# Altium footprint library EasyLib.PcbLib: 65 footprints (part 4 of 5)
Each footprint in its own frame and in the unit in brackets; x right, y up, seen from the top. Pads: shape width x height; smd on the part's side, far side on the other; paste and mask are expansions set on the pad; w line width, h text height; cw(c..) or ccw(c..) is an arc to the next point about the centre after c.
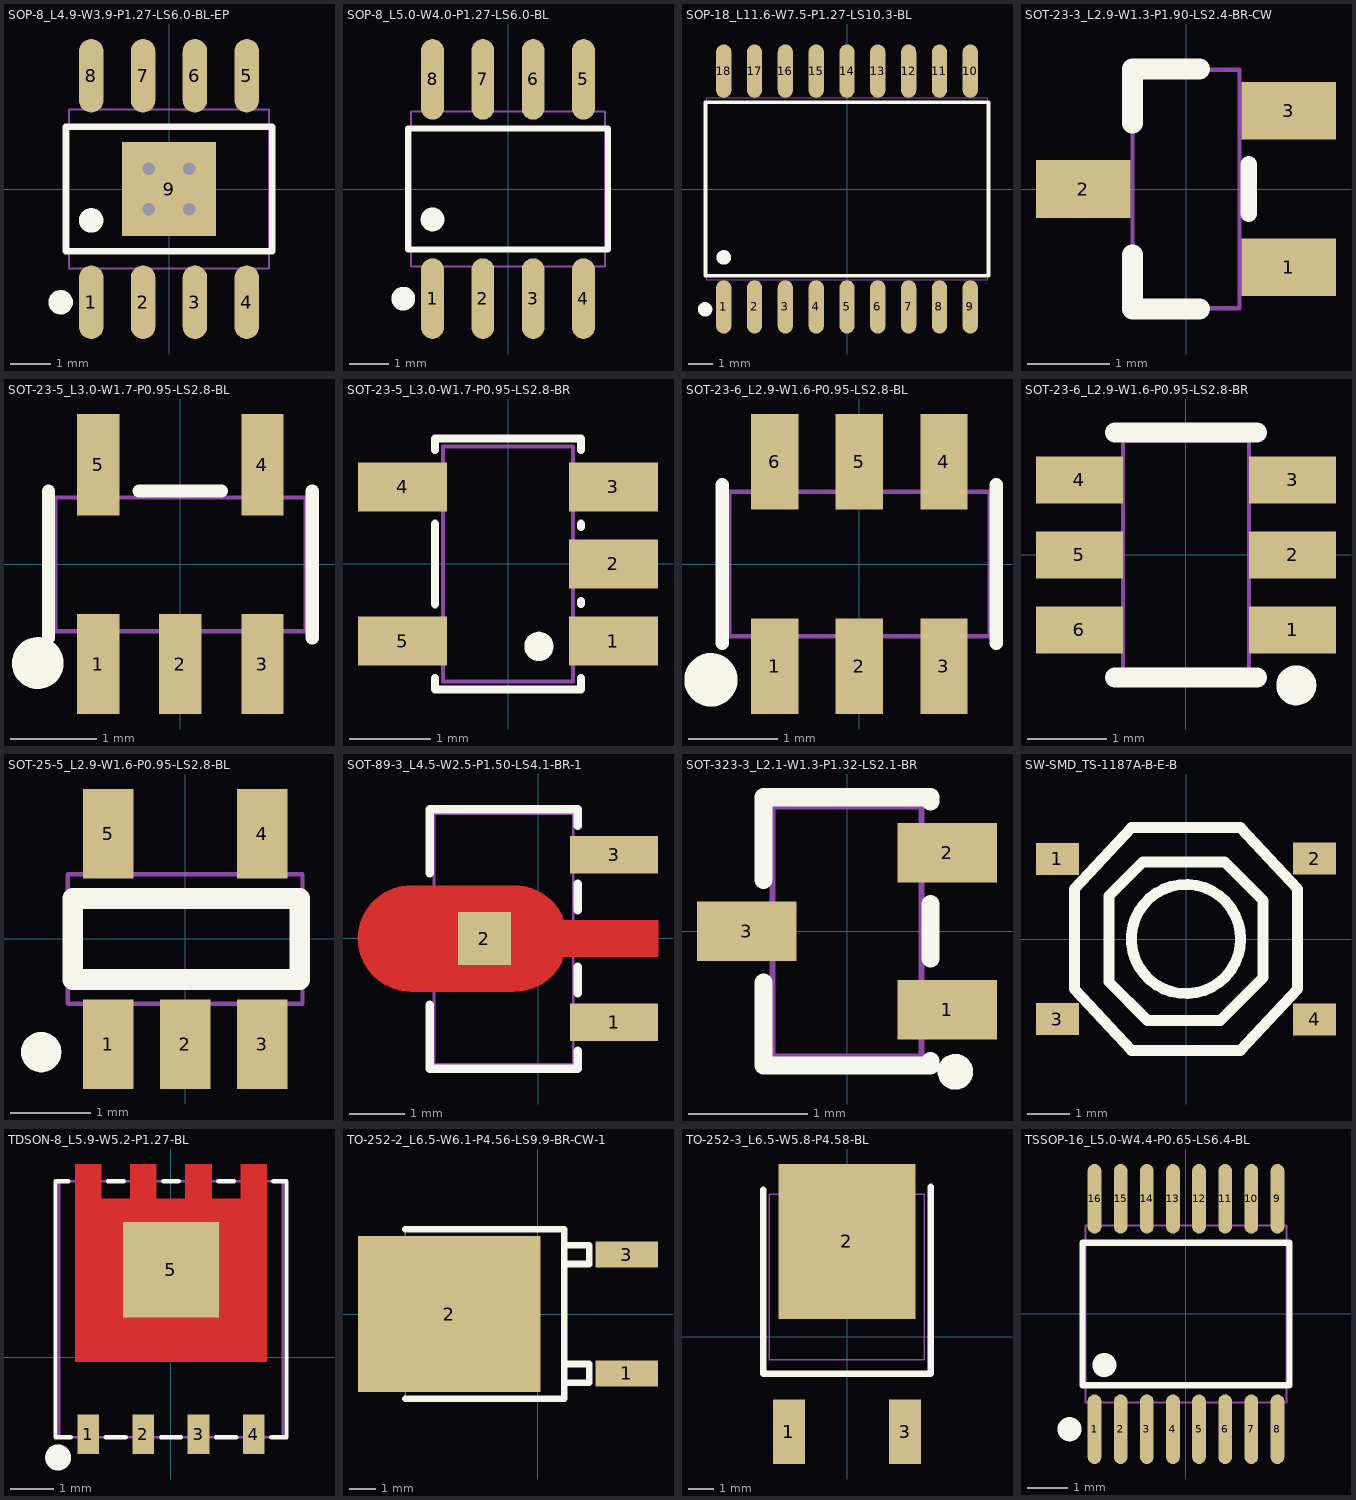
[diagram p3: the footprints below, top view; thin cyan lines are the x and y axes]

## SOP-8_L4.9-W3.9-P1.27-LS6.0-BL-EP [mm]
height 1.75
pads (13):
  oval 0.6x1.8 smd: 1(-1.905,-2.772) 2(-0.635,-2.772) 3(0.635,-2.772) 4(1.905,-2.772) 5(1.905,2.772) 6(0.635,2.772) 7(-0.635,2.772) 8(-1.905,2.772)
  rect 2.29x2.29 smd: 9(0,0)
  round 0.61 hole 0.305: ""(-0.5,-0.5) ""(-0.5,0.5) ""(0.5,-0.5) ""(0.5,0.5)
Top Overlay:
  circle w0.3: c-1.905,-0.769 r0.15
  circle w0.3: c-2.652,-2.772 r0.15
  lines w0.152: -2.526,-1.521 -2.526,1.521 2.526,1.521 2.526,-1.521 -2.526,-1.521
Mechanical 15:
  lines w0.051: -2.45,-1.95 -2.45,1.95 2.45,1.95 2.45,-1.95 -2.45,-1.95
3D body "SOP-8_L4.9-W3.9-H1.7-LS6.0-P1.30.step": height 1.75, standoff 0, extent -2.45,-3.053 2.45,3.053

## SOP-8_L5.0-W4.0-P1.27-LS6.0-BL [mm]
height 1.801
pads (8):
  oval 0.574x2.036 smd: 1(-1.905,-2.768) 2(-0.635,-2.768) 3(0.635,-2.768) 4(1.905,-2.768) 5(1.905,2.768) 6(0.635,2.768) 7(-0.635,2.768) 8(-1.905,2.768)
Top Overlay:
  circle w0.3: c-1.905,-0.769 r0.15
  circle w0.3: c-2.644,-2.768 r0.15
  lines w0.152: -2.526,-1.521 -2.526,1.521 2.526,1.521 2.526,-1.521 -2.526,-1.521
Mechanical 15:
  lines w0.051: -2.45,-1.95 -2.45,1.95 2.45,1.95 2.45,-1.95 -2.45,-1.95
3D body "SOP-8_L5.0-W4.0-H1.8-LS6.2-P1.27.step": height 1.8, standoff 0, extent -2.5,-3.103 2.5,3.103

## SOP-18_L11.6-W7.5-P1.27-LS10.3-BL [mm]
height 2.481
pads (18):
  oval 0.63x2.2 smd: 1(-5.08,-4.857) 2(-3.81,-4.857) 3(-2.54,-4.857) 4(-1.27,-4.857) 5(0,-4.857) 6(1.27,-4.857) 7(2.54,-4.857) 8(3.81,-4.857) 9(5.08,-4.857) 10(5.08,4.857) 11(3.81,4.857) 12(2.54,4.857) 13(1.27,4.857) 14(0,4.857) 15(-1.27,4.857) 16(-2.54,4.857) 17(-3.81,4.857) 18(-5.08,4.857)
Top Overlay:
  circle w0.3: c-5.08,-2.819 r0.15
  circle w0.3: c-5.847,-4.958 r0.15
  lines w0.152: -5.826,-3.571 -5.826,3.571 5.826,3.571 5.826,-3.571 -5.826,-3.571
Mechanical 15:
  lines w0.051: -5.775,-3.75 -5.775,3.75 5.775,3.75 5.775,-3.75 -5.775,-3.75
3D body "SOP-18_L11.5-W7.5-H2.5-LS10.3-P1.27.step": height 2.48, standoff 0, extent -5.725,-5.15 5.725,5.15

## SOT-23-3_L2.9-W1.3-P1.90-LS2.4-BR-CW [mm]
height 1.416
pads (3):
  rect 1.15x0.7 smd: 1(1.25,-0.95) 2(-1.25,0) 3(1.25,0.95)
Top Overlay:
  lines w0.2: 0.762,-0.3 0.762,0.3
  lines w0.254: -0.65,-0.8 -0.65,-1.46 0.165,-1.46 ; 0.165,1.46 -0.65,1.46 ; -0.65,0.8 -0.65,1.46 ; -0.65,0.8 -0.65,1.46 ; -0.65,0.8 -0.65,1.46
Mechanical 15:
  lines w0.051: -0.65,-1.45 -0.65,1.45 0.65,1.45 0.65,-1.45 -0.65,-1.45
3D body "SOT-23-3_L2.9-W1.3-P1.90-LS2.4-BR-CW.step": height 1.42, standoff 0, extent -1.45,-1.3 1.45,1.3

## SOT-23-5_L3.0-W1.7-P0.95-LS2.8-BL [mm]
height 1.25
pads (5):
  rect 0.49x1.157 smd: 1(-0.95,-1.154) 2(0,-1.154) 3(0.95,-1.154)
  rect 0.49x1.175 smd: 4(0.95,1.154) 5(-0.95,1.154)
Top Overlay:
  circle w0.3: c-1.651,-1.143 r0.15
  lines w0.152: -1.526,-0.851 -1.526,0.851 ; -0.476,0.851 0.476,0.851 ; 1.526,-0.851 1.526,0.851
Mechanical 15:
  lines w0.051: -1.45,-0.775 1.45,-0.775 1.45,0.775 -1.45,0.775 -1.45,-0.775
3D body "SOT-23-5_L2.9-W1.6-H1.1-LS2.8-P0.95.step": height 1.25, standoff 0, extent -1.45,-1.506 1.45,1.506

## SOT-23-5_L3.0-W1.7-P0.95-LS2.8-BR [mm]
height 1.25
pads (5):
  rect 1.1x0.6 smd: 1(1.3,-0.95) 2(1.3,0) 3(1.3,0.95) 4(-1.3,0.95) 5(-1.3,-0.95)
Top Overlay:
  region: 0.204,-1.016 0.205,-0.994 0.209,-0.972 0.216,-0.95 0.225,-0.93 0.237,-0.911 0.251,-0.894 0.267,-0.878 0.286,-0.865 0.305,-0.854 0.326,-0.846 0.348,-0.84 0.37,-0.837 0.392,-0.837 0.414,-0.84 0.436,-0.846 0.457,-0.854 0.477,-0.865 0.495,-0.878 0.511,-0.894 0.525,-0.911 0.537,-0.93 0.546,-0.95 0.553,-0.972 0.557,-0.994 0.558,-1.016 0.557,-1.038 0.553,-1.06 0.546,-1.082 0.537,-1.102 0.525,-1.121 0.511,-1.138 0.495,-1.154 0.477,-1.167 0.457,-1.178 0.436,-1.186 0.414,-1.192 0.392,-1.195 0.37,-1.195 0.348,-1.192 0.326,-1.186 0.305,-1.178 0.286,-1.167 0.267,-1.154 0.251,-1.138 0.237,-1.121 0.225,-1.102 0.216,-1.082 0.209,-1.06 0.205,-1.038
  lines w0.1: -0.9,-1.404 -0.9,-1.55 0.9,-1.55 0.9,-1.404 ; -0.9,-0.496 -0.9,0.496 ; -0.9,1.404 -0.9,1.55 0.9,1.55 0.9,1.404 ; 0.9,-0.496 0.9,-0.454 ; 0.9,0.454 0.9,0.496
Mechanical 15:
  lines w0.051: -0.8,-1.45 0.8,-1.45 0.8,1.45 -0.8,1.45 -0.8,-1.45
3D body "SOT-23-5_L2.9-W1.6-H1.1-LS2.8-P0.95.step": height 1.25, standoff 0, extent -1.506,-1.45 1.506,1.45

## SOT-23-6_L2.9-W1.6-P0.95-LS2.8-BL [mm]
height 1.65
pads (6):
  rect 0.532x1.072 smd: 1(-0.95,-1.149) 2(0,-1.149) 3(0.95,-1.149) 4(0.95,1.149) 5(0,1.149) 6(-0.95,1.149)
Top Overlay:
  circle w0.3: c-1.668,-1.301 r0.15
  lines w0.152: -1.539,-0.889 -1.539,0.889 ; 1.539,-0.889 1.539,0.889
Mechanical 15:
  lines w0.051: -1.463,-0.813 1.463,-0.813 1.463,0.813 -1.463,0.813 -1.463,-0.813
3D body "SOT-23-6_L2.9-W1.6-H1.5-LS2.8-P0.95.step": height 1.65, standoff 0, extent -1.45,-1.406 1.45,1.406

## SOT-23-6_L2.9-W1.6-P0.95-LS2.8-BR [mm]
height 1.65
pads (6):
  rect 1.1x0.6 smd: 1(1.35,-0.95) 2(1.35,0) 3(1.35,0.95) 4(-1.35,0.95) 5(-1.35,0) 6(-1.35,-0.95)
Top Overlay:
  circle w0.254: c1.397,-1.651 r0.127
  lines w0.254: -0.9,-1.55 0.9,-1.55 ; -0.9,1.55 0.9,1.55
Mechanical 15:
  lines w0.051: -0.8,-1.45 -0.8,1.45 0.8,1.45 0.8,-1.45 -0.8,-1.45
3D body "SOT-23-6_L2.9-W1.6-H1.5-LS2.8-P0.95.step": height 1.65, standoff 0, extent -1.406,-1.45 1.406,1.45

## SOT-25-5_L2.9-W1.6-P0.95-LS2.8-BL [mil]
height 49.25
pads (5):
  rect 24.5x43.5 smd: 1(-37.39,-51.18) 2(-0.02,-51.18) 3(37.39,-51.18) 4(37.39,51.18) 5(-37.39,51.18)
Top Overlay:
  lines w9.8: -70.06,-59.9 cw(c-70.01,-55) -69.96,-59.9
  lines w10: -54.61,-19.7 55.59,-19.7 55.59,19.7 -54.61,19.7 -54.61,-19.7
Mechanical 15:
  lines w2: -57.1,-31.5 -57.1,31.5 57.08,31.5 57.08,-31.5 -57.1,-31.5
3D body "SOT-25-5_L2.9-W1.6-P0.95-LS2.8-BL.step": height 49.25, standoff 0, extent -57.09,-55.12 57.09,55.12

## SOT-89-3_L4.5-W2.5-P1.50-LS4.1-BR-1 [mm]
height 1.531
pads (3):
  rect 1.575x0.672 smd: 1(1.356,-1.5) 3(1.356,1.5)
  rect 0.95x0.95 smd: 2(-0.966,0)
Top Layer:
  region: -2.283,0.95 -0.429,0.95 -0.384,0.949 -0.34,0.945 -0.296,0.94 -0.252,0.933 -0.208,0.924 -0.165,0.912 -0.123,0.899 -0.081,0.884 -0.04,0.866 0,0.847 0.04,0.826 0.078,0.803 0.115,0.779 0.151,0.752 0.185,0.724 0.219,0.695 0.251,0.663 0.281,0.631 0.31,0.597 0.337,0.562 0.362,0.525 0.386,0.487 0.408,0.449 0.428,0.409 0.447,0.33 2.144,0.33 2.144,-0.33 0.447,-0.33 0.428,-0.41 0.408,-0.449 0.386,-0.488 0.362,-0.526 0.337,-0.562 0.31,-0.598 0.281,-0.632 0.251,-0.664 0.219,-0.695 0.185,-0.725 0.151,-0.753 0.115,-0.779 0.078,-0.804 0.04,-0.827 0,-0.848 -0.04,-0.867 -0.081,-0.884 -0.123,-0.9 -0.165,-0.913 -0.208,-0.924 -0.252,-0.934 -0.296,-0.941 -0.34,-0.946 -0.384,-0.949 -0.429,-0.95 -2.283,-0.95 -2.328,-0.949 -2.372,-0.946 -2.416,-0.941 -2.46,-0.934 -2.504,-0.924 -2.547,-0.913 -2.589,-0.9 -2.631,-0.884 -2.672,-0.867 -2.713,-0.848 -2.752,-0.827 -2.79,-0.804 -2.827,-0.779 -2.863,-0.753 -2.898,-0.725 -2.931,-0.695 -2.963,-0.664 -2.993,-0.632 -3.022,-0.598 -3.049,-0.562 -3.075,-0.526 -3.098,-0.488 -3.12,-0.449 -3.141,-0.41 -3.159,-0.369 -3.175,-0.328 -3.189,-0.285 -3.202,-0.243 -3.212,-0.199 -3.22,-0.156 -3.227,-0.111 -3.231,-0.067 -3.233,-0.023 -3.233,0.022 -3.231,0.066 -3.227,0.111 -3.22,0.155 -3.212,0.199 -3.202,0.242 -3.189,0.285 -3.175,0.327 -3.159,0.368 -3.141,0.409 -3.12,0.449 -3.098,0.487 -3.075,0.525 -3.049,0.562 -3.022,0.597 -2.993,0.631 -2.963,0.663 -2.931,0.695 -2.898,0.724 -2.863,0.752 -2.827,0.779 -2.79,0.803 -2.752,0.826 -2.713,0.847 -2.672,0.866 -2.631,0.884 -2.589,0.899 -2.547,0.912 -2.504,0.924 -2.46,0.933 -2.416,0.94 -2.372,0.945 -2.328,0.949
Top Overlay:
  lines w0.152: -1.95,-1.186 -1.95,-2.335 0.702,-2.335 0.702,-2.016 ; -1.95,1.168 -1.95,2.317 0.702,2.317 0.702,2.016 ; 0.702,-0.984 0.702,-0.51 ; 0.702,0.51 0.702,0.984
Top Paste:
  region: -2.283,0.95 -0.429,0.95 -0.384,0.949 -0.34,0.945 -0.296,0.94 -0.252,0.933 -0.208,0.924 -0.165,0.912 -0.123,0.899 -0.081,0.884 -0.04,0.866 0,0.847 0.04,0.826 0.078,0.803 0.115,0.779 0.151,0.752 0.185,0.724 0.219,0.695 0.251,0.663 0.281,0.631 0.31,0.597 0.337,0.562 0.362,0.525 0.386,0.487 0.408,0.449 0.428,0.409 0.447,0.33 2.144,0.33 2.144,-0.33 0.447,-0.33 0.428,-0.41 0.408,-0.449 0.386,-0.488 0.362,-0.526 0.337,-0.562 0.31,-0.598 0.281,-0.632 0.251,-0.664 0.219,-0.695 0.185,-0.725 0.151,-0.753 0.115,-0.779 0.078,-0.804 0.04,-0.827 0,-0.848 -0.04,-0.867 -0.081,-0.884 -0.123,-0.9 -0.165,-0.913 -0.208,-0.924 -0.252,-0.934 -0.296,-0.941 -0.34,-0.946 -0.384,-0.949 -0.429,-0.95 -2.283,-0.95 -2.328,-0.949 -2.372,-0.946 -2.416,-0.941 -2.46,-0.934 -2.504,-0.924 -2.547,-0.913 -2.589,-0.9 -2.631,-0.884 -2.672,-0.867 -2.713,-0.848 -2.752,-0.827 -2.79,-0.804 -2.827,-0.779 -2.863,-0.753 -2.898,-0.725 -2.931,-0.695 -2.963,-0.664 -2.993,-0.632 -3.022,-0.598 -3.049,-0.562 -3.075,-0.526 -3.098,-0.488 -3.12,-0.449 -3.141,-0.41 -3.159,-0.369 -3.175,-0.328 -3.189,-0.285 -3.202,-0.243 -3.212,-0.199 -3.22,-0.156 -3.227,-0.111 -3.231,-0.067 -3.233,-0.023 -3.233,0.022 -3.231,0.066 -3.227,0.111 -3.22,0.155 -3.212,0.199 -3.202,0.242 -3.189,0.285 -3.175,0.327 -3.159,0.368 -3.141,0.409 -3.12,0.449 -3.098,0.487 -3.075,0.525 -3.049,0.562 -3.022,0.597 -2.993,0.631 -2.963,0.663 -2.931,0.695 -2.898,0.724 -2.863,0.752 -2.827,0.779 -2.79,0.803 -2.752,0.826 -2.713,0.847 -2.672,0.866 -2.631,0.884 -2.589,0.899 -2.547,0.912 -2.504,0.924 -2.46,0.933 -2.416,0.94 -2.372,0.945 -2.328,0.949
Top Solder:
  region: -2.283,0.95 -0.429,0.95 -0.384,0.949 -0.34,0.945 -0.296,0.94 -0.252,0.933 -0.208,0.924 -0.165,0.912 -0.123,0.899 -0.081,0.884 -0.04,0.866 0,0.847 0.04,0.826 0.078,0.803 0.115,0.779 0.151,0.752 0.185,0.724 0.219,0.695 0.251,0.663 0.281,0.631 0.31,0.597 0.337,0.562 0.362,0.525 0.386,0.487 0.408,0.449 0.428,0.409 0.447,0.33 2.144,0.33 2.144,-0.33 0.447,-0.33 0.428,-0.41 0.408,-0.449 0.386,-0.488 0.362,-0.526 0.337,-0.562 0.31,-0.598 0.281,-0.632 0.251,-0.664 0.219,-0.695 0.185,-0.725 0.151,-0.753 0.115,-0.779 0.078,-0.804 0.04,-0.827 0,-0.848 -0.04,-0.867 -0.081,-0.884 -0.123,-0.9 -0.165,-0.913 -0.208,-0.924 -0.252,-0.934 -0.296,-0.941 -0.34,-0.946 -0.384,-0.949 -0.429,-0.95 -2.283,-0.95 -2.328,-0.949 -2.372,-0.946 -2.416,-0.941 -2.46,-0.934 -2.504,-0.924 -2.547,-0.913 -2.589,-0.9 -2.631,-0.884 -2.672,-0.867 -2.713,-0.848 -2.752,-0.827 -2.79,-0.804 -2.827,-0.779 -2.863,-0.753 -2.898,-0.725 -2.931,-0.695 -2.963,-0.664 -2.993,-0.632 -3.022,-0.598 -3.049,-0.562 -3.075,-0.526 -3.098,-0.488 -3.12,-0.449 -3.141,-0.41 -3.159,-0.369 -3.175,-0.328 -3.189,-0.285 -3.202,-0.243 -3.212,-0.199 -3.22,-0.156 -3.227,-0.111 -3.231,-0.067 -3.233,-0.023 -3.233,0.022 -3.231,0.066 -3.227,0.111 -3.22,0.155 -3.212,0.199 -3.202,0.242 -3.189,0.285 -3.175,0.327 -3.159,0.368 -3.141,0.409 -3.12,0.449 -3.098,0.487 -3.075,0.525 -3.049,0.562 -3.022,0.597 -2.993,0.631 -2.963,0.663 -2.931,0.695 -2.898,0.724 -2.863,0.752 -2.827,0.779 -2.79,0.803 -2.752,0.826 -2.713,0.847 -2.672,0.866 -2.631,0.884 -2.589,0.899 -2.547,0.912 -2.504,0.924 -2.46,0.933 -2.416,0.94 -2.372,0.945 -2.328,0.949
Mechanical 15:
  lines w0.051: -1.874,-2.259 -1.874,2.241 0.626,2.241 0.626,-2.259 -1.874,-2.259
3D body "SOT-89-3_L4.5-W2.5-P1.50-LS4.1-BR-1.step": height 1.53, standoff 0, extent -2.379,-2.241 1.721,2.24

## SOT-323-3_L2.1-W1.3-P1.32-LS2.1-BR [mm]
height 1.176
pads (3):
  rect 0.835x0.5 smd: 1(0.843,-0.66) 2(0.843,0.66) 3(-0.843,0)
Top Overlay:
  circle w0.15: c0.91,-1.18 r0.075
  lines w0.152: -0.701,-0.43 -0.701,-1.126 0.701,-1.126 0.701,-1.09 ; -0.701,0.43 -0.701,0.904 -0.701,1.126 0.701,1.126 0.701,1.09 ; 0.701,-0.23 0.701,0.23
Mechanical 15:
  lines w0.051: -0.625,-1.05 -0.625,1.05 0.625,1.05 0.625,-1.05 -0.625,-1.05
3D body "SOT-323-3_L2.0-W1.3-H1.0-LS2.1-P1.30.step": height 1.18, standoff 0, extent -1.05,-1 1.05,1

## SW-SMD_TS-1187A-B-E-B [mm]
pads (4):
  rect 1x0.75 smd: 1(-3,1.87) 2(3,1.875) 3(-3,-1.87) 4(3,-1.875)
Top Overlay:
  circle w0.254: c0,0 r1.275
  lines w0.254: -2.6,-1.168 -1.275,-2.6 1.275,-2.6 2.6,-1.168 2.6,1.168 1.275,2.6 -1.275,2.6 -2.6,1.168 -2.6,-1.168 ; -1.801,-0.998 -0.899,-1.9 0.8,-1.9 1.801,-0.899 1.801,0.899 0.899,1.801 -1.001,1.801 -1.801,1.001 -1.801,-0.998

## TDSON-8_L5.9-W5.2-P1.27-BL [mm]
height 1.061
pads (5):
  rect 0.5x0.9 smd: 1(-1.905,-1.775) 2(-0.635,-1.775) 3(0.635,-1.775) 4(1.905,-1.775)
  rect 2.205x2.205 smd: 5(0,2.012)
Top Layer:
  region: -2.205,-0.1 2.205,-0.1 2.205,4.45 1.605,4.45 1.605,3.65 0.935,3.65 0.935,4.45 0.335,4.45 0.335,3.65 -0.335,3.65 -0.335,4.45 -0.935,4.45 -0.935,3.65 -1.605,3.65 -1.605,4.45 -2.205,4.45
Top Overlay:
  circle w0.3: c-2.6,-2.31 r0.15
  lines w0.1: -2.359,4.055 -2.66,4.055 -2.66,-1.845 -2.309,-1.845 ; -1.501,-1.845 -1.039,-1.845 ; -1.451,4.055 -1.089,4.055 ; -0.231,-1.845 0.231,-1.845 ; -0.181,4.055 0.181,4.055 ; 1.039,-1.845 1.501,-1.845 ; 1.089,4.055 1.451,4.055 ; 2.309,-1.845 2.66,-1.845 2.66,4.055 2.359,4.055
Top Paste:
  region: -2.205,-0.1 2.205,-0.1 2.205,4.45 1.605,4.45 1.605,3.65 0.935,3.65 0.935,4.45 0.335,4.45 0.335,3.65 -0.335,3.65 -0.335,4.45 -0.935,4.45 -0.935,3.65 -1.605,3.65 -1.605,4.45 -2.205,4.45
Top Solder:
  region: -2.205,-0.1 2.205,-0.1 2.205,4.45 1.605,4.45 1.605,3.65 0.935,3.65 0.935,4.45 0.335,4.45 0.335,3.65 -0.335,3.65 -0.335,4.45 -0.935,4.45 -0.935,3.65 -1.605,3.65 -1.605,4.45 -2.205,4.45
Mechanical 15:
  lines w0.051: -2.575,-1.845 -2.575,4.055 2.575,4.055 2.575,-1.845 -2.575,-1.845
3D body "TDSON-8_L5.9-W5.2-P1.27-BL.step": height 1.06, standoff 0, extent -2.755,-1.98 2.755,4.18

## TO-252-2_L6.5-W6.1-P4.56-LS9.9-BR-CW-1 [mm]
height 2.381
pads (3):
  rect 2.4x1 smd: 1(3.405,-2.28) 3(3.405,2.28)
  rect 7x6 smd: 2(-3.405,0)
Top Overlay:
  lines w0.254: -5.091,-3.25 -4.271,-3.25 1.009,-3.25 1.009,3.25 -5.091,3.25 ; 1.009,-2.64 1.969,-2.64 1.969,-1.92 1.009,-1.92 ; 1.009,1.92 1.969,1.92 1.969,2.64 1.009,2.64
Mechanical 15:
  lines w0.051: -5.094,-3.25 1.007,-3.25 1.007,3.25 -5.094,3.25 -5.094,-3.25
3D body "TO-252-2_L6.5-W6.1-P4.56-LS9.9-BR-CW-1.step": height 2.38, standoff 0, extent -6.102,-3.27 3.803,3.27

## TO-252-3_L6.5-W5.8-P4.58-BL [mm]
height 2.31
pads (3):
  rect 1.27x2.54 smd: 1(-2.288,-3.747) 3(2.288,-3.745)
  rect 5.4x6.1 smd: 2(-0.002,3.747)
Top Overlay:
  lines w0.254: -3.304,5.649 -3.304,5.776 -3.305,-1.463 3.299,-1.463 3.299,5.776 3.3,5.903
Mechanical 15:
  lines w0.051: -3.052,-0.903 -3.052,5.597 3.048,5.597 3.048,-0.903 -3.052,-0.903
3D body "TO-252-3_L6.5-W5.8-P4.58-BL.step": height 2.31, standoff 0, extent -3.175,-3.848 3.175,5.818

## TSSOP-16_L5.0-W4.4-P0.65-LS6.4-BL [mm]
height 1.05
pads (16):
  oval 0.343x1.731 smd: 1(-2.275,-2.866) 2(-1.625,-2.866) 3(-0.975,-2.866) 4(-0.325,-2.866) 5(0.325,-2.866) 6(0.975,-2.866) 7(1.625,-2.866) 8(2.275,-2.866) 9(2.275,2.866) 10(1.625,2.866) 11(0.975,2.866) 12(0.325,2.866) 13(-0.325,2.866) 14(-0.975,2.866) 15(-1.625,2.866) 16(-2.275,2.866)
Top Overlay:
  circle w0.3: c-2.032,-1.27 r0.15
  circle w0.3: c-2.899,-2.866 r0.15
  lines w0.152: -2.576,-1.771 -2.576,1.772 2.576,1.772 2.576,-1.771 -2.576,-1.771
Mechanical 15:
  lines w0.051: -2.5,-2.2 -2.5,2.2 2.5,2.2 2.5,-2.2 -2.5,-2.2
3D body "TSSOP-16_L5.0-W4.4-H1.0-LS6.4-P0.65.step": height 1.05, standoff 0, extent -2.5,-3.203 2.5,3.203